# Altium footprint library CM4.PcbLib: 10 footprints
Each footprint in its own frame and in the unit in brackets; x right, y up, seen from the top. Pads: shape width x height; smd on the part's side, far side on the other; paste and mask are expansions set on the pad; w line width, h text height; cw(c..) or ccw(c..) is an arc to the next point about the centre after c.
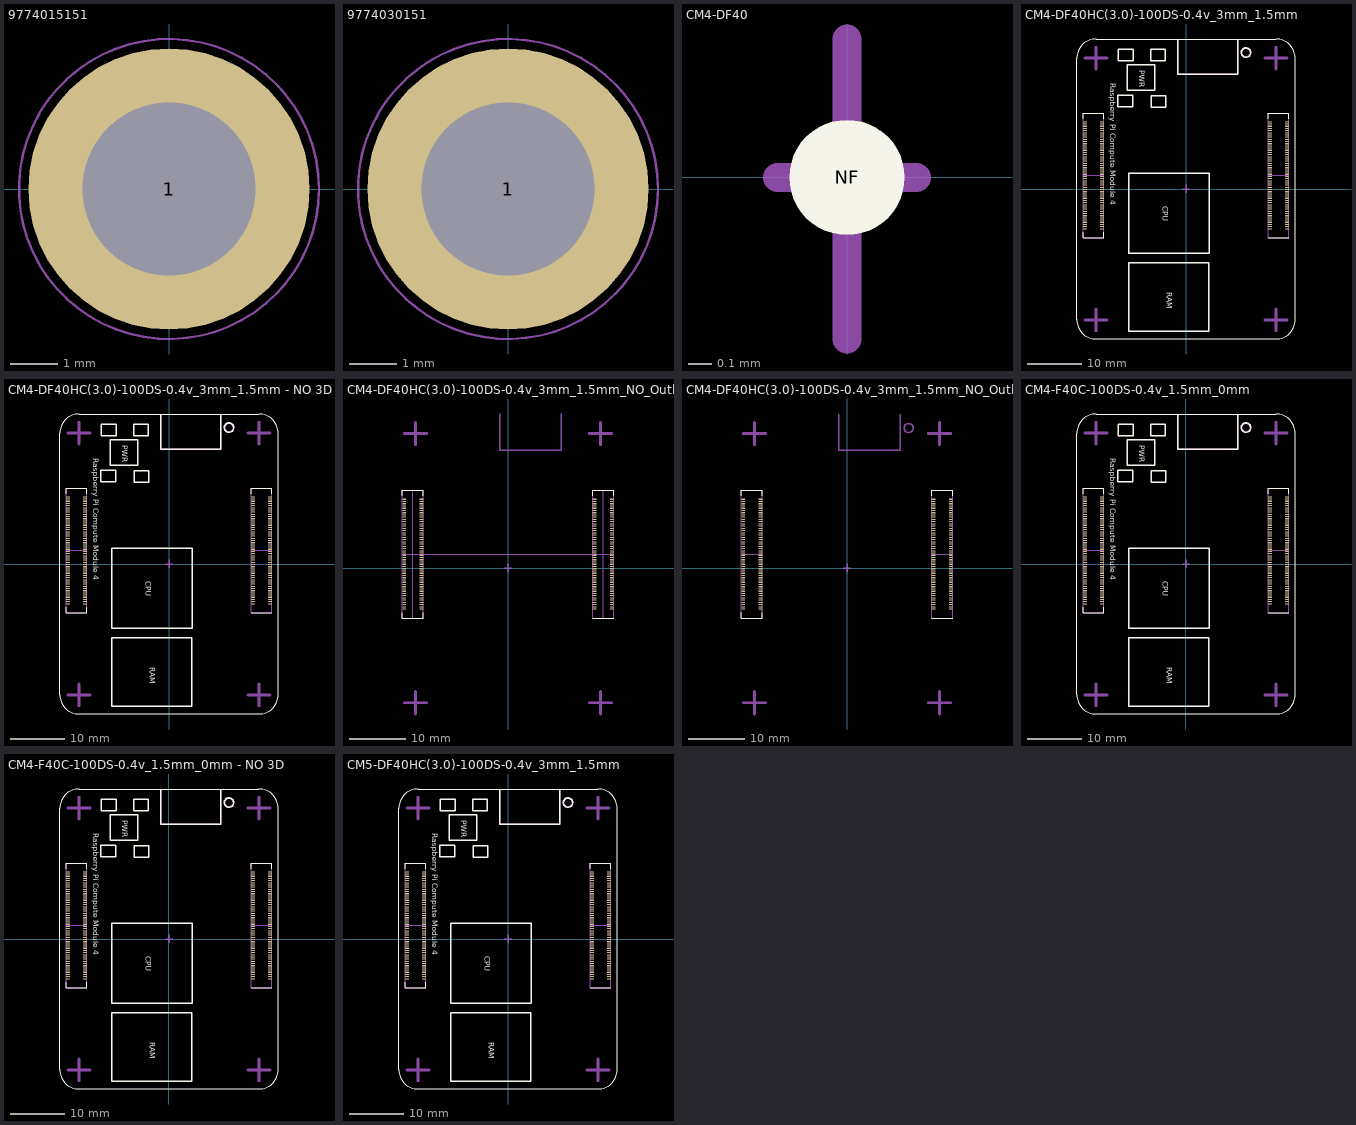
[diagram p0: the footprints below, top view; thin cyan lines are the x and y axes]

## 9774015151 [mm] "SMT Steel Spacer with internal Thread M2.5, height 1.5mm"
height 1.5
pads (1):
  round 6 / inner round 0 / far side round 0 hole 3.7 unplated: 1(0,0)
Top Paste:
  region: 0.325,2.902 0.57,2.874 1.044,2.738 1.488,2.524 1.89,2.239 2.239,1.89 2.524,1.488 2.738,1.044 2.874,0.57 2.902,0.325 1.872,0.325 1.842,0.467 1.749,0.743 1.615,1.002 1.443,1.237 1.237,1.442 1.002,1.614 0.744,1.748 0.468,1.842 0.325,1.872
  region: 2.902,-0.325 2.874,-0.57 2.738,-1.044 2.524,-1.488 2.239,-1.89 1.89,-2.239 1.488,-2.524 1.044,-2.738 0.57,-2.874 0.325,-2.902 0.325,-1.872 0.467,-1.842 0.743,-1.749 1.002,-1.615 1.237,-1.443 1.442,-1.237 1.614,-1.002 1.748,-0.744 1.842,-0.468 1.872,-0.325
  region: -0.325,-2.902 -0.57,-2.874 -1.044,-2.738 -1.488,-2.524 -1.89,-2.239 -2.239,-1.89 -2.524,-1.488 -2.738,-1.044 -2.874,-0.57 -2.902,-0.325 -1.872,-0.325 -1.842,-0.467 -1.749,-0.743 -1.615,-1.002 -1.443,-1.237 -1.237,-1.442 -1.002,-1.614 -0.744,-1.748 -0.468,-1.842 -0.325,-1.872
  region: -2.902,0.325 -2.874,0.57 -2.738,1.044 -2.524,1.488 -2.239,1.89 -1.89,2.239 -1.488,2.524 -1.044,2.738 -0.57,2.874 -0.325,2.902 -0.325,1.872 -0.467,1.842 -0.743,1.749 -1.002,1.615 -1.237,1.443 -1.442,1.237 -1.614,1.002 -1.748,0.744 -1.842,0.468 -1.872,0.325
Mechanical 11:
  circle w0.1: c0,0 r2.55
  text ".Designator" at -1.75,-0.75 h1.5
Mechanical 13:
  circle w0.1: c0,0 r2.55
Mechanical 15:
  circle w0.05: c0,0 r3.2
  lines w0.05: -0.5,0 0.5,0 ; 0,-0.5 0,0.5
3D body "9774015151.stp": height 1.5, standoff -1.4, extent -2.55,-2.547 2.55,2.547

## 9774030151 [mm] "SMT Steel Spacer with internal Thread M2.5, height 3mm"
height 3
pads (1):
  round 6 / inner round 0 / far side round 0 hole 3.7 unplated: 1(0,0)
Top Paste:
  region: 0.325,2.902 0.57,2.874 1.044,2.738 1.488,2.524 1.89,2.239 2.239,1.89 2.524,1.488 2.738,1.044 2.874,0.57 2.902,0.325 1.872,0.325 1.842,0.467 1.749,0.743 1.615,1.002 1.443,1.237 1.237,1.442 1.002,1.614 0.744,1.748 0.468,1.842 0.325,1.872
  region: 2.902,-0.325 2.874,-0.57 2.738,-1.044 2.524,-1.488 2.239,-1.89 1.89,-2.239 1.488,-2.524 1.044,-2.738 0.57,-2.874 0.325,-2.902 0.325,-1.872 0.467,-1.842 0.743,-1.749 1.002,-1.615 1.237,-1.443 1.442,-1.237 1.614,-1.002 1.748,-0.744 1.842,-0.468 1.872,-0.325
  region: -0.325,-2.902 -0.57,-2.874 -1.044,-2.738 -1.488,-2.524 -1.89,-2.239 -2.239,-1.89 -2.524,-1.488 -2.738,-1.044 -2.874,-0.57 -2.902,-0.325 -1.872,-0.325 -1.842,-0.467 -1.749,-0.743 -1.615,-1.002 -1.443,-1.237 -1.237,-1.442 -1.002,-1.614 -0.744,-1.748 -0.468,-1.842 -0.325,-1.872
  region: -2.902,0.325 -2.874,0.57 -2.738,1.044 -2.524,1.488 -2.239,1.89 -1.89,2.239 -1.488,2.524 -1.044,2.738 -0.57,2.874 -0.325,2.902 -0.325,1.872 -0.467,1.842 -0.743,1.749 -1.002,1.615 -1.237,1.443 -1.442,1.237 -1.614,1.002 -1.748,0.744 -1.842,0.468 -1.872,0.325
Mechanical 11:
  circle w0.1: c0,0 r2.55
  text ".Designator" at -1.75,-0.75 h1.5
Mechanical 13:
  circle w0.1: c0,0 r2.55
Mechanical 15:
  circle w0.05: c0,0 r3.2
  lines w0.05: -0.5,0 0.5,0 ; 0,-0.5 0,0.5
3D body "9774030151.stp": height 3, standoff -1.4, extent -2.55,-2.547 2.55,2.547

## CM4-DF40 [mm] "DF40"
pads (1):
  round 0.5 on Top Overlay mask+0: NF(0,0)
Mechanical 4:
  lines w0.127: -0.3,0 0.3,0 -0.3,0 ; 0,-0.7 0,0.6 0,-0.7

## CM4-DF40HC(3.0)-100DS-0.4v_3mm_1.5mm [mm] "DF40HC(3.0)-100DS-0.4v by Amornthep Phunsin"
pads (200):
  rect 0.7x0.2 smd: 1(18.5,-7.3) 2(15.42,-7.3) 3(18.5,-6.9) 4(15.42,-6.9) 5(18.5,-6.5) 6(15.42,-6.5) 7(18.5,-6.1) 8(15.42,-6.1) 9(18.5,-5.7) 10(15.42,-5.7) 11(18.5,-5.3) 12(15.42,-5.3) 13(18.5,-4.9) 14(15.42,-4.9) 15(18.5,-4.5) 16(15.42,-4.5) 17(18.5,-4.1) 18(15.42,-4.1) 19(18.5,-3.7) 20(15.42,-3.7) 21(18.5,-3.3) 22(15.42,-3.3) 23(18.5,-2.9) 24(15.42,-2.9) 25(18.5,-2.5) 26(15.42,-2.5) 27(18.5,-2.1) 28(15.42,-2.1) 29(18.5,-1.7) 30(15.42,-1.7) 31(18.5,-1.3) 32(15.42,-1.3) 33(18.5,-0.9) 34(15.42,-0.9) 35(18.5,-0.5) 36(15.42,-0.5) 37(18.5,-0.1) 38(15.42,-0.1) 39(18.5,0.3) 40(15.42,0.3) 41(18.5,0.7) 42(15.42,0.7) 43(18.5,1.1) 44(15.42,1.1) 45(18.5,1.5) 46(15.42,1.5) 47(18.5,1.9) 48(15.42,1.9) 49(18.5,2.3) 50(15.42,2.3) 51(18.5,2.7) 52(15.42,2.7) 53(18.5,3.1) 54(15.42,3.1) 55(18.5,3.5) 56(15.42,3.5) 57(18.5,3.9) 58(15.42,3.9) 59(18.5,4.3) 60(15.42,4.3) 61(18.5,4.7) 62(15.42,4.7) 63(18.5,5.1) 64(15.42,5.1) 65(18.5,5.5) 66(15.42,5.5) 67(18.5,5.9) 68(15.42,5.9) 69(18.5,6.3) 70(15.42,6.3) 71(18.5,6.7) 72(15.42,6.7) 73(18.5,7.1) 74(15.42,7.1) 75(18.5,7.5) 76(15.42,7.5) 77(18.5,7.9) 78(15.42,7.9) 79(18.5,8.3) 80(15.42,8.3) 81(18.5,8.7) 82(15.42,8.7) 83(18.5,9.1) 84(15.42,9.1) 85(18.5,9.5) 86(15.42,9.5) 87(18.5,9.9) 88(15.42,9.9) 89(18.5,10.3) 90(15.42,10.3) 91(18.5,10.7) 92(15.42,10.7) 93(18.5,11.1) 94(15.42,11.1) 95(18.5,11.5) 96(15.42,11.5) 97(18.5,11.9) 98(15.42,11.9) 99(18.5,12.3) 100(15.42,12.3) 101(-15.42,-7.3) 102(-18.5,-7.3) 103(-15.42,-6.9) 104(-18.5,-6.9) 105(-15.42,-6.5) 106(-18.5,-6.5) 107(-15.42,-6.1) 108(-18.5,-6.1) 109(-15.42,-5.7) 110(-18.5,-5.7) 111(-15.42,-5.3) 112(-18.5,-5.3) 113(-15.42,-4.9) 114(-18.5,-4.9) 115(-15.42,-4.5) 116(-18.5,-4.5) 117(-15.42,-4.1) 118(-18.5,-4.1) 119(-15.42,-3.7) 120(-18.5,-3.7) 121(-15.42,-3.3) 122(-18.5,-3.3) 123(-15.42,-2.9) 124(-18.5,-2.9) 125(-15.42,-2.5) 126(-18.5,-2.5) 127(-15.42,-2.1) 128(-18.5,-2.1) 129(-15.42,-1.7) 130(-18.5,-1.7) 131(-15.42,-1.3) 132(-18.5,-1.3) 133(-15.42,-0.9) 134(-18.5,-0.9) 135(-15.42,-0.5) 136(-18.5,-0.5) 137(-15.42,-0.1) 138(-18.5,-0.1) 139(-15.42,0.3) 140(-18.5,0.3) 141(-15.42,0.7) 142(-18.5,0.7) 143(-15.42,1.1) 144(-18.5,1.1) 145(-15.42,1.5) 146(-18.5,1.5) 147(-15.42,1.9) 148(-18.5,1.9) 149(-15.42,2.3) 150(-18.5,2.3) 151(-15.42,2.7) 152(-18.5,2.7) 153(-15.42,3.1) 154(-18.5,3.1) 155(-15.42,3.5) 156(-18.5,3.5) 157(-15.42,3.9) 158(-18.5,3.9) 159(-15.42,4.3) 160(-18.5,4.3) 161(-15.42,4.7) 162(-18.5,4.7) 163(-15.42,5.1) 164(-18.5,5.1) 165(-15.42,5.5) 166(-18.5,5.5) 167(-15.42,5.9) 168(-18.5,5.9) 169(-15.42,6.3) 170(-18.5,6.3) 171(-15.42,6.7) 172(-18.5,6.7) 173(-15.42,7.1) 174(-18.5,7.1) 175(-15.42,7.5) 176(-18.5,7.5) 177(-15.42,7.9) 178(-18.5,7.9) 179(-15.42,8.3) 180(-18.5,8.3) 181(-15.42,8.7) 182(-18.5,8.7) 183(-15.42,9.1) 184(-18.5,9.1) 185(-15.42,9.5) 186(-18.5,9.5) 187(-15.42,9.9) 188(-18.5,9.9) 189(-15.42,10.3) 190(-18.5,10.3) 191(-15.42,10.7) 192(-18.5,10.7) 193(-15.42,11.1) 194(-18.5,11.1) 195(-15.42,11.5) 196(-18.5,11.5) 197(-15.42,11.9) 198(-18.5,11.9) 199(-15.42,12.3) 200(-18.5,12.3)
Top Overlay:
  circle w0.254: c11,25 r0.86
  lines w0.12: -18.85,-7.9 -18.85,-8.9 -15.07,-8.9 -15.07,-7.9 ; -18.85,12.9 -18.85,13.9 -15.07,13.9 -15.07,12.9 ; 15.07,-8.9 18.85,-8.9 ; 15.07,12.9 15.07,13.9 18.85,13.9 18.85,12.9 ; -20,-24 ccw(c-16.5,-24) -16.5,-27.5 16.5,-27.5 ccw(c16.5,-24) 20,-24 20,24 ccw(c16.5,24) 16.5,27.5 -16.5,27.5 ccw(c-16.5,24) -20,24 -20,-24
  lines w0.254: -1.5,24 -1.5,27.5 -1.5,21 9.5,21 9.5,27.5 ; -12.5,15.1 -12.5,17.2 -9.8,17.2 -9.8,15.1 -12.5,15.1 ; -12.4,23.5 -12.4,25.6 -9.7,25.6 -9.7,23.5 -12.4,23.5 ; -10.8,18.1 -5.7,18.1 -5.7,22.8 -10.8,22.8 -10.8,18.1 ; -10.5,-26.1 4.2,-26.1 4.2,-13.5 -10.5,-13.5 -10.5,-26.1 ; -10.5,-11.8 4.3,-11.8 4.3,2.9 -10.5,2.9 -10.5,-11.8 ; -6.5,23.5 -6.5,25.6 -3.8,25.6 -3.8,23.5 -6.5,23.5 ; -6.4,15 -6.4,17.1 -3.7,17.1 -3.7,15 -6.4,15
  text "Raspberry Pi Compute Module 4" at -13.913,19.346 h1
  text "CPU" at -4.246,-3.154 h1
  text "RAM" at -3.546,-18.954 h1
  text "PWR" at -8.602,21.761 h1
Mechanical 4:
  circle w0.254: c11,25 r0.806
  lines w0.12: -18.85,-8.9 -15.07,-8.9 ; -18.85,-8.9 -18.85,13.9 ; -18.85,-8.9 -15.07,-8.9 ; -18.85,-8.9 -18.85,13.9 ; -18.85,13.9 -15.07,13.9 ; -18.85,13.9 -15.07,13.9 ; -15.07,-8.9 -15.07,13.9 ; -15.07,-8.9 -15.07,13.9 ; 15.07,-8.9 15.07,13.9 ; 15.07,-8.9 18.85,-8.9 ; 15.07,-8.9 15.07,13.9 ; 15.07,-8.9 18.85,-8.9 ; 15.07,13.9 18.85,13.9 ; 15.07,13.9 18.85,13.9 ; 18.85,-8.9 18.85,13.9 ; 18.85,-8.9 18.85,13.9 ; -18.83,2.5 -15.05,2.5 -18.83,2.5 ; 15.07,2.5 18.85,2.5 15.07,2.5
  lines w0.254: -1.5,27.5 -1.5,21 9.5,21 9.5,27.5 ; -0.7,0 0.7,0 -0.7,0 ; 0,-0.7 0,0.8 0,-0.7
  lines w0.5: -18.5,-24 -16.5,-24 ; -18.5,24 -16.5,24 ; -16.5,-26 -16.5,-24 ; -16.5,-22 -16.5,-24 ; -16.5,22 -16.5,24 ; -16.5,26 -16.5,24 ; -14.5,-24 -16.5,-24 ; -14.5,24 -16.5,24 ; 14.5,-24 16.5,-24 ; 14.5,24 16.5,24 ; 16.5,-26 16.5,-24 ; 16.5,-22 16.5,-24 ; 16.5,22 16.5,24 ; 16.5,26 16.5,24 ; 18.5,-24 16.5,-24 ; 18.5,24 16.5,24
  text "PCIe" at -18,-3.051 h0.7
  text "USB" at -16.9,-4.134 h0.7
  text "CAM1" at -16.9,0.749 h0.7
  text "HDMI1" at -18.1,5.958 h0.7
  text "ETH" at 16.5,-4.751 h0.7
  text "TV" at -17,-2.751 h0.7
  text "HDMI0" at -18,10.375 h0.7
  text "CAM0" at -18,0.783 h0.7
  text "5V" at 17,9.9 h0.7
  text "DSI0" at -16.9,6.949 h0.7
  text "DS1" at -17.5,13.049 h0.7
  text "1V8" at 15.8,11.225 h0.7
  text "3V3" at 15.8,8.625 h0.7
  text "SD" at 16.4,6.991 h0.7
  text "GPIO" at 16.5,0.625 h0.7
  text "Wireless / Cutout" at -0.932,23.1 h0.9
3D body "DF40HC(3.0)-100DS-0.4V.stp": height 2.9, standoff 0, extent -18.69,-8.785 -15.31,13.815
3D body "DF40HC(3.0)-100DS-0.4V.stp": height 2.9, standoff 0, extent 15.31,-8.785 18.69,13.815
3D body "cm4-rev1-3_new.STEP": height 6.75, standoff 1.97, extent -20,-27.5 20,27.5

## CM4-DF40HC(3.0)-100DS-0.4v_3mm_1.5mm - NO 3D [mm] "DF40HC(3.0)-100DS-0.4v by Amornthep Phunsin"
pads (200):
  rect 0.7x0.2 smd: 1(18.5,-7.3) 2(15.42,-7.3) 3(18.5,-6.9) 4(15.42,-6.9) 5(18.5,-6.5) 6(15.42,-6.5) 7(18.5,-6.1) 8(15.42,-6.1) 9(18.5,-5.7) 10(15.42,-5.7) 11(18.5,-5.3) 12(15.42,-5.3) 13(18.5,-4.9) 14(15.42,-4.9) 15(18.5,-4.5) 16(15.42,-4.5) 17(18.5,-4.1) 18(15.42,-4.1) 19(18.5,-3.7) 20(15.42,-3.7) 21(18.5,-3.3) 22(15.42,-3.3) 23(18.5,-2.9) 24(15.42,-2.9) 25(18.5,-2.5) 26(15.42,-2.5) 27(18.5,-2.1) 28(15.42,-2.1) 29(18.5,-1.7) 30(15.42,-1.7) 31(18.5,-1.3) 32(15.42,-1.3) 33(18.5,-0.9) 34(15.42,-0.9) 35(18.5,-0.5) 36(15.42,-0.5) 37(18.5,-0.1) 38(15.42,-0.1) 39(18.5,0.3) 40(15.42,0.3) 41(18.5,0.7) 42(15.42,0.7) 43(18.5,1.1) 44(15.42,1.1) 45(18.5,1.5) 46(15.42,1.5) 47(18.5,1.9) 48(15.42,1.9) 49(18.5,2.3) 50(15.42,2.3) 51(18.5,2.7) 52(15.42,2.7) 53(18.5,3.1) 54(15.42,3.1) 55(18.5,3.5) 56(15.42,3.5) 57(18.5,3.9) 58(15.42,3.9) 59(18.5,4.3) 60(15.42,4.3) 61(18.5,4.7) 62(15.42,4.7) 63(18.5,5.1) 64(15.42,5.1) 65(18.5,5.5) 66(15.42,5.5) 67(18.5,5.9) 68(15.42,5.9) 69(18.5,6.3) 70(15.42,6.3) 71(18.5,6.7) 72(15.42,6.7) 73(18.5,7.1) 74(15.42,7.1) 75(18.5,7.5) 76(15.42,7.5) 77(18.5,7.9) 78(15.42,7.9) 79(18.5,8.3) 80(15.42,8.3) 81(18.5,8.7) 82(15.42,8.7) 83(18.5,9.1) 84(15.42,9.1) 85(18.5,9.5) 86(15.42,9.5) 87(18.5,9.9) 88(15.42,9.9) 89(18.5,10.3) 90(15.42,10.3) 91(18.5,10.7) 92(15.42,10.7) 93(18.5,11.1) 94(15.42,11.1) 95(18.5,11.5) 96(15.42,11.5) 97(18.5,11.9) 98(15.42,11.9) 99(18.5,12.3) 100(15.42,12.3) 101(-15.42,-7.3) 102(-18.5,-7.3) 103(-15.42,-6.9) 104(-18.5,-6.9) 105(-15.42,-6.5) 106(-18.5,-6.5) 107(-15.42,-6.1) 108(-18.5,-6.1) 109(-15.42,-5.7) 110(-18.5,-5.7) 111(-15.42,-5.3) 112(-18.5,-5.3) 113(-15.42,-4.9) 114(-18.5,-4.9) 115(-15.42,-4.5) 116(-18.5,-4.5) 117(-15.42,-4.1) 118(-18.5,-4.1) 119(-15.42,-3.7) 120(-18.5,-3.7) 121(-15.42,-3.3) 122(-18.5,-3.3) 123(-15.42,-2.9) 124(-18.5,-2.9) 125(-15.42,-2.5) 126(-18.5,-2.5) 127(-15.42,-2.1) 128(-18.5,-2.1) 129(-15.42,-1.7) 130(-18.5,-1.7) 131(-15.42,-1.3) 132(-18.5,-1.3) 133(-15.42,-0.9) 134(-18.5,-0.9) 135(-15.42,-0.5) 136(-18.5,-0.5) 137(-15.42,-0.1) 138(-18.5,-0.1) 139(-15.42,0.3) 140(-18.5,0.3) 141(-15.42,0.7) 142(-18.5,0.7) 143(-15.42,1.1) 144(-18.5,1.1) 145(-15.42,1.5) 146(-18.5,1.5) 147(-15.42,1.9) 148(-18.5,1.9) 149(-15.42,2.3) 150(-18.5,2.3) 151(-15.42,2.7) 152(-18.5,2.7) 153(-15.42,3.1) 154(-18.5,3.1) 155(-15.42,3.5) 156(-18.5,3.5) 157(-15.42,3.9) 158(-18.5,3.9) 159(-15.42,4.3) 160(-18.5,4.3) 161(-15.42,4.7) 162(-18.5,4.7) 163(-15.42,5.1) 164(-18.5,5.1) 165(-15.42,5.5) 166(-18.5,5.5) 167(-15.42,5.9) 168(-18.5,5.9) 169(-15.42,6.3) 170(-18.5,6.3) 171(-15.42,6.7) 172(-18.5,6.7) 173(-15.42,7.1) 174(-18.5,7.1) 175(-15.42,7.5) 176(-18.5,7.5) 177(-15.42,7.9) 178(-18.5,7.9) 179(-15.42,8.3) 180(-18.5,8.3) 181(-15.42,8.7) 182(-18.5,8.7) 183(-15.42,9.1) 184(-18.5,9.1) 185(-15.42,9.5) 186(-18.5,9.5) 187(-15.42,9.9) 188(-18.5,9.9) 189(-15.42,10.3) 190(-18.5,10.3) 191(-15.42,10.7) 192(-18.5,10.7) 193(-15.42,11.1) 194(-18.5,11.1) 195(-15.42,11.5) 196(-18.5,11.5) 197(-15.42,11.9) 198(-18.5,11.9) 199(-15.42,12.3) 200(-18.5,12.3)
Top Overlay:
  circle w0.254: c11,25 r0.86
  lines w0.12: -18.85,-7.9 -18.85,-8.9 -15.07,-8.9 -15.07,-7.9 ; -18.85,12.9 -18.85,13.9 -15.07,13.9 -15.07,12.9 ; 15.07,-8.9 18.85,-8.9 ; 15.07,12.9 15.07,13.9 18.85,13.9 18.85,12.9 ; -20,-24 ccw(c-16.5,-24) -16.5,-27.5 16.5,-27.5 ccw(c16.5,-24) 20,-24 20,24 ccw(c16.5,24) 16.5,27.5 -16.5,27.5 ccw(c-16.5,24) -20,24 -20,-24
  lines w0.254: -1.5,24 -1.5,27.5 -1.5,21 9.5,21 9.5,27.5 ; -12.5,15.1 -12.5,17.2 -9.8,17.2 -9.8,15.1 -12.5,15.1 ; -12.4,23.5 -12.4,25.6 -9.7,25.6 -9.7,23.5 -12.4,23.5 ; -10.8,18.1 -5.7,18.1 -5.7,22.8 -10.8,22.8 -10.8,18.1 ; -10.5,-26.1 4.2,-26.1 4.2,-13.5 -10.5,-13.5 -10.5,-26.1 ; -10.5,-11.8 4.3,-11.8 4.3,2.9 -10.5,2.9 -10.5,-11.8 ; -6.5,23.5 -6.5,25.6 -3.8,25.6 -3.8,23.5 -6.5,23.5 ; -6.4,15 -6.4,17.1 -3.7,17.1 -3.7,15 -6.4,15
  text "Raspberry Pi Compute Module 4" at -13.913,19.346 h1
  text "CPU" at -4.246,-3.154 h1
  text "RAM" at -3.546,-18.954 h1
  text "PWR" at -8.602,21.761 h1
Mechanical 4:
  circle w0.254: c11,25 r0.806
  lines w0.12: -18.85,-8.9 -15.07,-8.9 ; -18.85,-8.9 -18.85,13.9 ; -18.85,-8.9 -15.07,-8.9 ; -18.85,-8.9 -18.85,13.9 ; -18.85,13.9 -15.07,13.9 ; -18.85,13.9 -15.07,13.9 ; -15.07,-8.9 -15.07,13.9 ; -15.07,-8.9 -15.07,13.9 ; 15.07,-8.9 15.07,13.9 ; 15.07,-8.9 18.85,-8.9 ; 15.07,-8.9 15.07,13.9 ; 15.07,-8.9 18.85,-8.9 ; 15.07,13.9 18.85,13.9 ; 15.07,13.9 18.85,13.9 ; 18.85,-8.9 18.85,13.9 ; 18.85,-8.9 18.85,13.9 ; -18.83,2.5 -15.05,2.5 -18.83,2.5 ; 15.07,2.5 18.85,2.5 15.07,2.5
  lines w0.254: -1.5,27.5 -1.5,21 9.5,21 9.5,27.5 ; -0.7,0 0.7,0 -0.7,0 ; 0,-0.7 0,0.8 0,-0.7
  lines w0.5: -18.5,-24 -16.5,-24 ; -18.5,24 -16.5,24 ; -16.5,-26 -16.5,-24 ; -16.5,-22 -16.5,-24 ; -16.5,22 -16.5,24 ; -16.5,26 -16.5,24 ; -14.5,-24 -16.5,-24 ; -14.5,24 -16.5,24 ; 14.5,-24 16.5,-24 ; 14.5,24 16.5,24 ; 16.5,-26 16.5,-24 ; 16.5,-22 16.5,-24 ; 16.5,22 16.5,24 ; 16.5,26 16.5,24 ; 18.5,-24 16.5,-24 ; 18.5,24 16.5,24
  text "PCIe" at -18,-3.051 h0.7
  text "USB" at -16.9,-4.134 h0.7
  text "CAM1" at -16.9,0.749 h0.7
  text "HDMI1" at -18.1,5.958 h0.7
  text "ETH" at 16.5,-4.751 h0.7
  text "TV" at -17,-2.751 h0.7
  text "HDMI0" at -18,10.375 h0.7
  text "CAM0" at -18,0.783 h0.7
  text "5V" at 17,9.9 h0.7
  text "DSI0" at -16.9,6.949 h0.7
  text "DS1" at -17.5,13.049 h0.7
  text "1V8" at 15.8,11.225 h0.7
  text "3V3" at 15.8,8.625 h0.7
  text "SD" at 16.4,6.991 h0.7
  text "GPIO" at 16.5,0.625 h0.7
  text "Wireless / Cutout" at -0.932,23.1 h0.9
3D body "DF40HC(3.0)-100DS-0.4V.stp": height 2.9, standoff 0, extent -18.69,-8.785 -15.31,13.815
3D body "DF40HC(3.0)-100DS-0.4V.stp": height 2.9, standoff 0, extent 15.31,-8.785 18.69,13.815

## CM4-DF40HC(3.0)-100DS-0.4v_3mm_1.5mm_NO_Outline [mm] "DF40HC(3.0)-100DS-0.4v by Amornthep Phunsin"
pads (200):
  rect 0.7x0.2 smd: 1(18.5,-7.3) 2(15.42,-7.3) 3(18.5,-6.9) 4(15.42,-6.9) 5(18.5,-6.5) 6(15.42,-6.5) 7(18.5,-6.1) 8(15.42,-6.1) 9(18.5,-5.7) 10(15.42,-5.7) 11(18.5,-5.3) 12(15.42,-5.3) 13(18.5,-4.9) 14(15.42,-4.9) 15(18.5,-4.5) 16(15.42,-4.5) 17(18.5,-4.1) 18(15.42,-4.1) 19(18.5,-3.7) 20(15.42,-3.7) 21(18.5,-3.3) 22(15.42,-3.3) 23(18.5,-2.9) 24(15.42,-2.9) 25(18.5,-2.5) 26(15.42,-2.5) 27(18.5,-2.1) 28(15.42,-2.1) 29(18.5,-1.7) 30(15.42,-1.7) 31(18.5,-1.3) 32(15.42,-1.3) 33(18.5,-0.9) 34(15.42,-0.9) 35(18.5,-0.5) 36(15.42,-0.5) 37(18.5,-0.1) 38(15.42,-0.1) 39(18.5,0.3) 40(15.42,0.3) 41(18.5,0.7) 42(15.42,0.7) 43(18.5,1.1) 44(15.42,1.1) 45(18.5,1.5) 46(15.42,1.5) 47(18.5,1.9) 48(15.42,1.9) 49(18.5,2.3) 50(15.42,2.3) 51(18.5,2.7) 52(15.42,2.7) 53(18.5,3.1) 54(15.42,3.1) 55(18.5,3.5) 56(15.42,3.5) 57(18.5,3.9) 58(15.42,3.9) 59(18.5,4.3) 60(15.42,4.3) 61(18.5,4.7) 62(15.42,4.7) 63(18.5,5.1) 64(15.42,5.1) 65(18.5,5.5) 66(15.42,5.5) 67(18.5,5.9) 68(15.42,5.9) 69(18.5,6.3) 70(15.42,6.3) 71(18.5,6.7) 72(15.42,6.7) 73(18.5,7.1) 74(15.42,7.1) 75(18.5,7.5) 76(15.42,7.5) 77(18.5,7.9) 78(15.42,7.9) 79(18.5,8.3) 80(15.42,8.3) 81(18.5,8.7) 82(15.42,8.7) 83(18.5,9.1) 84(15.42,9.1) 85(18.5,9.5) 86(15.42,9.5) 87(18.5,9.9) 88(15.42,9.9) 89(18.5,10.3) 90(15.42,10.3) 91(18.5,10.7) 92(15.42,10.7) 93(18.5,11.1) 94(15.42,11.1) 95(18.5,11.5) 96(15.42,11.5) 97(18.5,11.9) 98(15.42,11.9) 99(18.5,12.3) 100(15.42,12.3) 101(-15.42,-7.3) 102(-18.5,-7.3) 103(-15.42,-6.9) 104(-18.5,-6.9) 105(-15.42,-6.5) 106(-18.5,-6.5) 107(-15.42,-6.1) 108(-18.5,-6.1) 109(-15.42,-5.7) 110(-18.5,-5.7) 111(-15.42,-5.3) 112(-18.5,-5.3) 113(-15.42,-4.9) 114(-18.5,-4.9) 115(-15.42,-4.5) 116(-18.5,-4.5) 117(-15.42,-4.1) 118(-18.5,-4.1) 119(-15.42,-3.7) 120(-18.5,-3.7) 121(-15.42,-3.3) 122(-18.5,-3.3) 123(-15.42,-2.9) 124(-18.5,-2.9) 125(-15.42,-2.5) 126(-18.5,-2.5) 127(-15.42,-2.1) 128(-18.5,-2.1) 129(-15.42,-1.7) 130(-18.5,-1.7) 131(-15.42,-1.3) 132(-18.5,-1.3) 133(-15.42,-0.9) 134(-18.5,-0.9) 135(-15.42,-0.5) 136(-18.5,-0.5) 137(-15.42,-0.1) 138(-18.5,-0.1) 139(-15.42,0.3) 140(-18.5,0.3) 141(-15.42,0.7) 142(-18.5,0.7) 143(-15.42,1.1) 144(-18.5,1.1) 145(-15.42,1.5) 146(-18.5,1.5) 147(-15.42,1.9) 148(-18.5,1.9) 149(-15.42,2.3) 150(-18.5,2.3) 151(-15.42,2.7) 152(-18.5,2.7) 153(-15.42,3.1) 154(-18.5,3.1) 155(-15.42,3.5) 156(-18.5,3.5) 157(-15.42,3.9) 158(-18.5,3.9) 159(-15.42,4.3) 160(-18.5,4.3) 161(-15.42,4.7) 162(-18.5,4.7) 163(-15.42,5.1) 164(-18.5,5.1) 165(-15.42,5.5) 166(-18.5,5.5) 167(-15.42,5.9) 168(-18.5,5.9) 169(-15.42,6.3) 170(-18.5,6.3) 171(-15.42,6.7) 172(-18.5,6.7) 173(-15.42,7.1) 174(-18.5,7.1) 175(-15.42,7.5) 176(-18.5,7.5) 177(-15.42,7.9) 178(-18.5,7.9) 179(-15.42,8.3) 180(-18.5,8.3) 181(-15.42,8.7) 182(-18.5,8.7) 183(-15.42,9.1) 184(-18.5,9.1) 185(-15.42,9.5) 186(-18.5,9.5) 187(-15.42,9.9) 188(-18.5,9.9) 189(-15.42,10.3) 190(-18.5,10.3) 191(-15.42,10.7) 192(-18.5,10.7) 193(-15.42,11.1) 194(-18.5,11.1) 195(-15.42,11.5) 196(-18.5,11.5) 197(-15.42,11.9) 198(-18.5,11.9) 199(-15.42,12.3) 200(-18.5,12.3)
Top Overlay:
  lines w0.12: -18.85,-7.9 -18.85,-8.9 -15.07,-8.9 -15.07,-7.9 ; -18.85,12.9 -18.85,13.9 -15.07,13.9 -15.07,12.9 ; 15.07,-8.9 18.85,-8.9 ; 15.07,12.9 15.07,13.9 18.85,13.9 18.85,12.9
Mechanical 4:
  lines w0.12: -16.96,-8.9 -16.96,13.9 -18.85,13.9 ; -16.5,2.5 16.85,2.5 ; 16.96,-8.9 16.96,13.9 15.07,13.9 ; -18.85,-8.9 -18.85,13.9 ; -18.85,-8.9 -15.07,-8.9 ; -18.85,-8.9 -18.85,13.9 ; -18.85,-8.9 -15.07,-8.9 ; -18.85,13.9 -15.07,13.9 ; -18.85,13.9 -15.07,13.9 ; -15.07,-8.9 -15.07,13.9 ; -15.07,-8.9 -15.07,13.9 ; 15.07,-8.9 18.85,-8.9 ; 15.07,-8.9 15.07,13.9 ; 15.07,-8.9 18.85,-8.9 ; 15.07,-8.9 15.07,13.9 ; 15.07,13.9 18.85,13.9 ; 15.07,13.9 18.85,13.9 ; 15.07,13.9 18.85,13.9 ; 18.85,-8.9 18.85,13.9 ; 18.85,-8.9 18.85,13.9 ; -18.83,2.5 -15.05,2.5 -18.83,2.5 ; 15.07,2.5 18.85,2.5 15.07,2.5
  lines w0.254: -1.5,27.5 -1.5,21 9.5,21 9.5,27.5 ; -0.7,0 0.7,0 -0.7,0 ; 0,-0.7 0,0.8 0,-0.7
  lines w0.5: -18.5,-24 -16.5,-24 ; -18.5,24 -16.5,24 ; -16.5,-26 -16.5,-24 ; -16.5,-22 -16.5,-24 ; -16.5,22 -16.5,24 ; -16.5,26 -16.5,24 ; -14.5,-24 -16.5,-24 ; -14.5,24 -16.5,24 ; 14.5,-24 16.5,-24 ; 14.5,24 16.5,24 ; 16.5,-26 16.5,-24 ; 16.5,-22 16.5,-24 ; 16.5,22 16.5,24 ; 16.5,26 16.5,24 ; 18.5,-24 16.5,-24 ; 18.5,24 16.5,24
  text "Wireless / Cutout" at -0.932,23.1 h0.9
  text "GPIO" at 15.87,0.625 h0.7
  text "SD" at 15.87,6.991 h0.7
  text "3V3" at 15.8,8.625 h0.7
  text "1V8" at 15.8,11.225 h0.7
  text "DS1" at -18.05,13.049 h0.7
  text "DSI0" at -16.9,6.949 h0.7
  text "5V" at 17,9.9 h0.7
  text "CAM0" at -18.05,0.783 h0.7
  text "HDMI0" at -18.05,10.375 h0.7
  text "TV" at -17,-2.751 h0.7
  text "ETH" at 15.87,-4.751 h0.7
  text "HDMI1" at -18.1,5.958 h0.7
  text "CAM1" at -16.9,0.749 h0.7
  text "USB" at -16.9,-4.134 h0.7
  text "PCIe" at -18.05,-3.051 h0.7
3D body "DF40HC(3.0)-100DS-0.4V.stp": height 2.9, standoff 0, extent 15.31,-8.785 18.69,13.815
3D body "DF40HC(3.0)-100DS-0.4V.stp": height 2.9, standoff 0, extent -18.69,-8.785 -15.31,13.815

## CM4-DF40HC(3.0)-100DS-0.4v_3mm_1.5mm_NO_Outline-3D [mm] "DF40HC(3.0)-100DS-0.4v by Amornthep Phunsin"
pads (200):
  rect 0.7x0.2 smd: 1(18.5,-7.3) 2(15.42,-7.3) 3(18.5,-6.9) 4(15.42,-6.9) 5(18.5,-6.5) 6(15.42,-6.5) 7(18.5,-6.1) 8(15.42,-6.1) 9(18.5,-5.7) 10(15.42,-5.7) 11(18.5,-5.3) 12(15.42,-5.3) 13(18.5,-4.9) 14(15.42,-4.9) 15(18.5,-4.5) 16(15.42,-4.5) 17(18.5,-4.1) 18(15.42,-4.1) 19(18.5,-3.7) 20(15.42,-3.7) 21(18.5,-3.3) 22(15.42,-3.3) 23(18.5,-2.9) 24(15.42,-2.9) 25(18.5,-2.5) 26(15.42,-2.5) 27(18.5,-2.1) 28(15.42,-2.1) 29(18.5,-1.7) 30(15.42,-1.7) 31(18.5,-1.3) 32(15.42,-1.3) 33(18.5,-0.9) 34(15.42,-0.9) 35(18.5,-0.5) 36(15.42,-0.5) 37(18.5,-0.1) 38(15.42,-0.1) 39(18.5,0.3) 40(15.42,0.3) 41(18.5,0.7) 42(15.42,0.7) 43(18.5,1.1) 44(15.42,1.1) 45(18.5,1.5) 46(15.42,1.5) 47(18.5,1.9) 48(15.42,1.9) 49(18.5,2.3) 50(15.42,2.3) 51(18.5,2.7) 52(15.42,2.7) 53(18.5,3.1) 54(15.42,3.1) 55(18.5,3.5) 56(15.42,3.5) 57(18.5,3.9) 58(15.42,3.9) 59(18.5,4.3) 60(15.42,4.3) 61(18.5,4.7) 62(15.42,4.7) 63(18.5,5.1) 64(15.42,5.1) 65(18.5,5.5) 66(15.42,5.5) 67(18.5,5.9) 68(15.42,5.9) 69(18.5,6.3) 70(15.42,6.3) 71(18.5,6.7) 72(15.42,6.7) 73(18.5,7.1) 74(15.42,7.1) 75(18.5,7.5) 76(15.42,7.5) 77(18.5,7.9) 78(15.42,7.9) 79(18.5,8.3) 80(15.42,8.3) 81(18.5,8.7) 82(15.42,8.7) 83(18.5,9.1) 84(15.42,9.1) 85(18.5,9.5) 86(15.42,9.5) 87(18.5,9.9) 88(15.42,9.9) 89(18.5,10.3) 90(15.42,10.3) 91(18.5,10.7) 92(15.42,10.7) 93(18.5,11.1) 94(15.42,11.1) 95(18.5,11.5) 96(15.42,11.5) 97(18.5,11.9) 98(15.42,11.9) 99(18.5,12.3) 100(15.42,12.3) 101(-15.42,-7.3) 102(-18.5,-7.3) 103(-15.42,-6.9) 104(-18.5,-6.9) 105(-15.42,-6.5) 106(-18.5,-6.5) 107(-15.42,-6.1) 108(-18.5,-6.1) 109(-15.42,-5.7) 110(-18.5,-5.7) 111(-15.42,-5.3) 112(-18.5,-5.3) 113(-15.42,-4.9) 114(-18.5,-4.9) 115(-15.42,-4.5) 116(-18.5,-4.5) 117(-15.42,-4.1) 118(-18.5,-4.1) 119(-15.42,-3.7) 120(-18.5,-3.7) 121(-15.42,-3.3) 122(-18.5,-3.3) 123(-15.42,-2.9) 124(-18.5,-2.9) 125(-15.42,-2.5) 126(-18.5,-2.5) 127(-15.42,-2.1) 128(-18.5,-2.1) 129(-15.42,-1.7) 130(-18.5,-1.7) 131(-15.42,-1.3) 132(-18.5,-1.3) 133(-15.42,-0.9) 134(-18.5,-0.9) 135(-15.42,-0.5) 136(-18.5,-0.5) 137(-15.42,-0.1) 138(-18.5,-0.1) 139(-15.42,0.3) 140(-18.5,0.3) 141(-15.42,0.7) 142(-18.5,0.7) 143(-15.42,1.1) 144(-18.5,1.1) 145(-15.42,1.5) 146(-18.5,1.5) 147(-15.42,1.9) 148(-18.5,1.9) 149(-15.42,2.3) 150(-18.5,2.3) 151(-15.42,2.7) 152(-18.5,2.7) 153(-15.42,3.1) 154(-18.5,3.1) 155(-15.42,3.5) 156(-18.5,3.5) 157(-15.42,3.9) 158(-18.5,3.9) 159(-15.42,4.3) 160(-18.5,4.3) 161(-15.42,4.7) 162(-18.5,4.7) 163(-15.42,5.1) 164(-18.5,5.1) 165(-15.42,5.5) 166(-18.5,5.5) 167(-15.42,5.9) 168(-18.5,5.9) 169(-15.42,6.3) 170(-18.5,6.3) 171(-15.42,6.7) 172(-18.5,6.7) 173(-15.42,7.1) 174(-18.5,7.1) 175(-15.42,7.5) 176(-18.5,7.5) 177(-15.42,7.9) 178(-18.5,7.9) 179(-15.42,8.3) 180(-18.5,8.3) 181(-15.42,8.7) 182(-18.5,8.7) 183(-15.42,9.1) 184(-18.5,9.1) 185(-15.42,9.5) 186(-18.5,9.5) 187(-15.42,9.9) 188(-18.5,9.9) 189(-15.42,10.3) 190(-18.5,10.3) 191(-15.42,10.7) 192(-18.5,10.7) 193(-15.42,11.1) 194(-18.5,11.1) 195(-15.42,11.5) 196(-18.5,11.5) 197(-15.42,11.9) 198(-18.5,11.9) 199(-15.42,12.3) 200(-18.5,12.3)
Top Overlay:
  lines w0.12: -18.85,-7.9 -18.85,-8.9 -15.07,-8.9 -15.07,-7.9 ; -18.85,12.9 -18.85,13.9 -15.07,13.9 -15.07,12.9 ; 15.07,-8.9 18.85,-8.9 ; 15.07,12.9 15.07,13.9 18.85,13.9 18.85,12.9
Mechanical 4:
  circle w0.254: c11,25 r0.806
  lines w0.12: -18.85,-8.9 -15.07,-8.9 ; -18.85,-8.9 -18.85,13.9 ; -18.85,-8.9 -15.07,-8.9 ; -18.85,-8.9 -18.85,13.9 ; -18.85,13.9 -15.07,13.9 ; -18.85,13.9 -15.07,13.9 ; -15.07,-8.9 -15.07,13.9 ; -15.07,-8.9 -15.07,13.9 ; 15.07,-8.9 15.07,13.9 ; 15.07,-8.9 18.85,-8.9 ; 15.07,-8.9 15.07,13.9 ; 15.07,-8.9 18.85,-8.9 ; 15.07,13.9 18.85,13.9 ; 15.07,13.9 18.85,13.9 ; 18.85,-8.9 18.85,13.9 ; 18.85,-8.9 18.85,13.9 ; -18.83,2.5 -15.05,2.5 -18.83,2.5 ; 15.07,2.5 18.85,2.5 15.07,2.5
  lines w0.254: -1.5,27.5 -1.5,21 9.5,21 9.5,27.5 ; -0.7,0 0.7,0 -0.7,0 ; 0,-0.7 0,0.8 0,-0.7
  lines w0.5: -18.5,-24 -16.5,-24 ; -18.5,24 -16.5,24 ; -16.5,-26 -16.5,-24 ; -16.5,-22 -16.5,-24 ; -16.5,22 -16.5,24 ; -16.5,26 -16.5,24 ; -14.5,-24 -16.5,-24 ; -14.5,24 -16.5,24 ; 14.5,-24 16.5,-24 ; 14.5,24 16.5,24 ; 16.5,-26 16.5,-24 ; 16.5,-22 16.5,-24 ; 16.5,22 16.5,24 ; 16.5,26 16.5,24 ; 18.5,-24 16.5,-24 ; 18.5,24 16.5,24
  text "PCIe" at -18,-3.051 h0.7
  text "USB" at -16.9,-4.134 h0.7
  text "CAM1" at -16.9,0.749 h0.7
  text "HDMI1" at -18.1,5.958 h0.7
  text "ETH" at 16.5,-4.751 h0.7
  text "TV" at -17,-2.751 h0.7
  text "HDMI0" at -18,10.375 h0.7
  text "CAM0" at -18,0.783 h0.7
  text "5V" at 17,9.9 h0.7
  text "DSI0" at -16.9,6.949 h0.7
  text "DS1" at -17.5,13.049 h0.7
  text "1V8" at 15.8,11.225 h0.7
  text "3V3" at 15.8,8.625 h0.7
  text "SD" at 16.4,6.991 h0.7
  text "GPIO" at 16.5,0.625 h0.7
  text "Wireless / Cutout" at -0.932,23.1 h0.9
3D body "DF40HC(3.0)-100DS-0.4V.stp": height 2.9, standoff 0, extent -18.69,-8.785 -15.31,13.815
3D body "DF40HC(3.0)-100DS-0.4V.stp": height 2.9, standoff 0, extent 15.31,-8.785 18.69,13.815

## CM4-F40C-100DS-0.4v_1.5mm_0mm [mm] "DF40C-100DS-0.4v by Amornthep Phunsin"
pads (200):
  rect 0.7x0.2 smd: 1(18.5,-7.3) 2(15.42,-7.3) 3(18.5,-6.9) 4(15.42,-6.9) 5(18.5,-6.5) 6(15.42,-6.5) 7(18.5,-6.1) 8(15.42,-6.1) 9(18.5,-5.7) 10(15.42,-5.7) 11(18.5,-5.3) 12(15.42,-5.3) 13(18.5,-4.9) 14(15.42,-4.9) 15(18.5,-4.5) 16(15.42,-4.5) 17(18.5,-4.1) 18(15.42,-4.1) 19(18.5,-3.7) 20(15.42,-3.7) 21(18.5,-3.3) 22(15.42,-3.3) 23(18.5,-2.9) 24(15.42,-2.9) 25(18.5,-2.5) 26(15.42,-2.5) 27(18.5,-2.1) 28(15.42,-2.1) 29(18.5,-1.7) 30(15.42,-1.7) 31(18.5,-1.3) 32(15.42,-1.3) 33(18.5,-0.9) 34(15.42,-0.9) 35(18.5,-0.5) 36(15.42,-0.5) 37(18.5,-0.1) 38(15.42,-0.1) 39(18.5,0.3) 40(15.42,0.3) 41(18.5,0.7) 42(15.42,0.7) 43(18.5,1.1) 44(15.42,1.1) 45(18.5,1.5) 46(15.42,1.5) 47(18.5,1.9) 48(15.42,1.9) 49(18.5,2.3) 50(15.42,2.3) 51(18.5,2.7) 52(15.42,2.7) 53(18.5,3.1) 54(15.42,3.1) 55(18.5,3.5) 56(15.42,3.5) 57(18.5,3.9) 58(15.42,3.9) 59(18.5,4.3) 60(15.42,4.3) 61(18.5,4.7) 62(15.42,4.7) 63(18.5,5.1) 64(15.42,5.1) 65(18.5,5.5) 66(15.42,5.5) 67(18.5,5.9) 68(15.42,5.9) 69(18.5,6.3) 70(15.42,6.3) 71(18.5,6.7) 72(15.42,6.7) 73(18.5,7.1) 74(15.42,7.1) 75(18.5,7.5) 76(15.42,7.5) 77(18.5,7.9) 78(15.42,7.9) 79(18.5,8.3) 80(15.42,8.3) 81(18.5,8.7) 82(15.42,8.7) 83(18.5,9.1) 84(15.42,9.1) 85(18.5,9.5) 86(15.42,9.5) 87(18.5,9.9) 88(15.42,9.9) 89(18.5,10.3) 90(15.42,10.3) 91(18.5,10.7) 92(15.42,10.7) 93(18.5,11.1) 94(15.42,11.1) 95(18.5,11.5) 96(15.42,11.5) 97(18.5,11.9) 98(15.42,11.9) 99(18.5,12.3) 100(15.42,12.3) 101(-15.42,-7.3) 102(-18.5,-7.3) 103(-15.42,-6.9) 104(-18.5,-6.9) 105(-15.42,-6.5) 106(-18.5,-6.5) 107(-15.42,-6.1) 108(-18.5,-6.1) 109(-15.42,-5.7) 110(-18.5,-5.7) 111(-15.42,-5.3) 112(-18.5,-5.3) 113(-15.42,-4.9) 114(-18.5,-4.9) 115(-15.42,-4.5) 116(-18.5,-4.5) 117(-15.42,-4.1) 118(-18.5,-4.1) 119(-15.42,-3.7) 120(-18.5,-3.7) 121(-15.42,-3.3) 122(-18.5,-3.3) 123(-15.42,-2.9) 124(-18.5,-2.9) 125(-15.42,-2.5) 126(-18.5,-2.5) 127(-15.42,-2.1) 128(-18.5,-2.1) 129(-15.42,-1.7) 130(-18.5,-1.7) 131(-15.42,-1.3) 132(-18.5,-1.3) 133(-15.42,-0.9) 134(-18.5,-0.9) 135(-15.42,-0.5) 136(-18.5,-0.5) 137(-15.42,-0.1) 138(-18.5,-0.1) 139(-15.42,0.3) 140(-18.5,0.3) 141(-15.42,0.7) 142(-18.5,0.7) 143(-15.42,1.1) 144(-18.5,1.1) 145(-15.42,1.5) 146(-18.5,1.5) 147(-15.42,1.9) 148(-18.5,1.9) 149(-15.42,2.3) 150(-18.5,2.3) 151(-15.42,2.7) 152(-18.5,2.7) 153(-15.42,3.1) 154(-18.5,3.1) 155(-15.42,3.5) 156(-18.5,3.5) 157(-15.42,3.9) 158(-18.5,3.9) 159(-15.42,4.3) 160(-18.5,4.3) 161(-15.42,4.7) 162(-18.5,4.7) 163(-15.42,5.1) 164(-18.5,5.1) 165(-15.42,5.5) 166(-18.5,5.5) 167(-15.42,5.9) 168(-18.5,5.9) 169(-15.42,6.3) 170(-18.5,6.3) 171(-15.42,6.7) 172(-18.5,6.7) 173(-15.42,7.1) 174(-18.5,7.1) 175(-15.42,7.5) 176(-18.5,7.5) 177(-15.42,7.9) 178(-18.5,7.9) 179(-15.42,8.3) 180(-18.5,8.3) 181(-15.42,8.7) 182(-18.5,8.7) 183(-15.42,9.1) 184(-18.5,9.1) 185(-15.42,9.5) 186(-18.5,9.5) 187(-15.42,9.9) 188(-18.5,9.9) 189(-15.42,10.3) 190(-18.5,10.3) 191(-15.42,10.7) 192(-18.5,10.7) 193(-15.42,11.1) 194(-18.5,11.1) 195(-15.42,11.5) 196(-18.5,11.5) 197(-15.42,11.9) 198(-18.5,11.9) 199(-15.42,12.3) 200(-18.5,12.3)
Top Overlay:
  circle w0.254: c11,25 r0.86
  lines w0.02: -1.5,24 -1.5,27.5 -1.5,21 9.5,21 9.5,27.5
  lines w0.12: -18.85,-7.9 -18.85,-8.9 -15.07,-8.9 ; -18.85,12.9 -18.85,13.9 -15.07,13.9 ; 15.07,-8.9 18.85,-8.9 ; 18.85,12.9 18.85,13.9 15.07,13.9 ; -15.07,-8.9 -15.07,-7.9 -15.07,-8.9 ; -15.07,13.9 -15.07,12.9 -15.07,13.9 ; 15.07,13.9 15.07,12.9 15.07,13.9 ; -20,-24 ccw(c-16.5,-24) -16.5,-27.5 16.5,-27.5 ccw(c16.5,-24) 20,-24 20,24 ccw(c16.5,24) 16.5,27.5 -16.5,27.5 ccw(c-16.5,24) -20,24 -20,-24
  lines w0.254: -1.5,24 -1.5,27.5 -1.5,21 9.5,21 9.5,27.5 ; -12.5,15.1 -9.8,15.1 -9.8,17.2 -12.5,17.2 -12.5,15.1 ; -12.4,23.5 -9.7,23.5 -9.7,25.6 -12.4,25.6 -12.4,23.5 ; -10.8,18.1 -10.8,22.8 -5.7,22.8 -5.7,18.1 -10.8,18.1 ; -10.5,-26.1 -10.5,-13.5 4.2,-13.5 4.2,-26.1 -10.5,-26.1 ; -10.5,-11.8 -10.5,2.9 4.3,2.9 4.3,-11.8 -10.5,-11.8 ; -6.5,23.5 -3.8,23.5 -3.8,25.6 -6.5,25.6 -6.5,23.5 ; -6.4,15 -3.7,15 -3.7,17.1 -6.4,17.1 -6.4,15
  text "PWR" at -8.602,21.761 h1
  text "RAM" at -3.546,-18.954 h1
  text "CPU" at -4.246,-3.154 h1
  text "Raspberry Pi Compute Module 4" at -13.913,19.346 h1
Mechanical 4:
  circle w0.254: c11,25 r0.806
  lines w0.12: -18.83,2.5 -15.05,2.5 ; 15.07,2.5 18.85,2.5 ; -18.85,-8.9 -15.07,-8.9 -15.07,13.9 -18.85,13.9 -18.85,-8.9 ; 15.07,-8.9 15.07,13.9 18.85,13.9 18.85,-8.9 15.07,-8.9
  lines w0.254: -1.5,27.5 -1.5,21 9.5,21 9.5,27.5 ; -0.7,0 0.7,0 ; 0,-0.7 0,0.8
  lines w0.5: -18.5,-24 -16.5,-24 ; -18.5,24 -16.5,24 ; -16.5,-26 -16.5,-24 ; -16.5,-22 -16.5,-24 ; -16.5,22 -16.5,24 ; -16.5,26 -16.5,24 ; -14.5,-24 -16.5,-24 ; -14.5,24 -16.5,24 ; 14.5,-24 16.5,-24 ; 14.5,24 16.5,24 ; 16.5,-26 16.5,-24 ; 16.5,-22 16.5,-24 ; 16.5,22 16.5,24 ; 16.5,26 16.5,24 ; 18.5,-24 16.5,-24 ; 18.5,24 16.5,24
  text "Wireless / Cutout" at -0.932,23.1 h0.9
  text "PCIe" at -18,-3.051 h0.7
  text "USB" at -16.9,-4.134 h0.7
  text "CAM1" at -16.9,0.749 h0.7
  text "HDMI1" at -18.1,5.958 h0.7
  text "ETH" at 16.5,-4.751 h0.7
  text "TV" at -17,-2.751 h0.7
  text "HDMI0" at -18,10.375 h0.7
  text "CAM0" at -18,0.783 h0.7
  text "5V" at 17,9.9 h0.7
  text "DSI0" at -16.9,6.949 h0.7
  text "DS1" at -17.5,13.049 h0.7
  text "1V8" at 15.8,11.225 h0.7
  text "3V3" at 15.8,8.625 h0.7
  text "SD" at 16.4,6.991 h0.7
  text "GPIO" at 16.5,0.625 h0.7
3D body "DF40C-100DS.stp": height 1.4, standoff -0.05, extent 15.31,-8.785 18.69,13.815
3D body "DF40C-100DS.stp": height 1.4, standoff -0.05, extent -18.69,-8.785 -15.31,13.815
3D body "cm4-rev1-3_new.STEP": height 5.16, standoff 0.38, extent -20,-27.5 20,27.5

## CM4-F40C-100DS-0.4v_1.5mm_0mm - NO 3D [mm] "DF40C-100DS-0.4v by Amornthep Phunsin"
pads (200):
  rect 0.7x0.2 smd: 1(18.5,-7.3) 2(15.42,-7.3) 3(18.5,-6.9) 4(15.42,-6.9) 5(18.5,-6.5) 6(15.42,-6.5) 7(18.5,-6.1) 8(15.42,-6.1) 9(18.5,-5.7) 10(15.42,-5.7) 11(18.5,-5.3) 12(15.42,-5.3) 13(18.5,-4.9) 14(15.42,-4.9) 15(18.5,-4.5) 16(15.42,-4.5) 17(18.5,-4.1) 18(15.42,-4.1) 19(18.5,-3.7) 20(15.42,-3.7) 21(18.5,-3.3) 22(15.42,-3.3) 23(18.5,-2.9) 24(15.42,-2.9) 25(18.5,-2.5) 26(15.42,-2.5) 27(18.5,-2.1) 28(15.42,-2.1) 29(18.5,-1.7) 30(15.42,-1.7) 31(18.5,-1.3) 32(15.42,-1.3) 33(18.5,-0.9) 34(15.42,-0.9) 35(18.5,-0.5) 36(15.42,-0.5) 37(18.5,-0.1) 38(15.42,-0.1) 39(18.5,0.3) 40(15.42,0.3) 41(18.5,0.7) 42(15.42,0.7) 43(18.5,1.1) 44(15.42,1.1) 45(18.5,1.5) 46(15.42,1.5) 47(18.5,1.9) 48(15.42,1.9) 49(18.5,2.3) 50(15.42,2.3) 51(18.5,2.7) 52(15.42,2.7) 53(18.5,3.1) 54(15.42,3.1) 55(18.5,3.5) 56(15.42,3.5) 57(18.5,3.9) 58(15.42,3.9) 59(18.5,4.3) 60(15.42,4.3) 61(18.5,4.7) 62(15.42,4.7) 63(18.5,5.1) 64(15.42,5.1) 65(18.5,5.5) 66(15.42,5.5) 67(18.5,5.9) 68(15.42,5.9) 69(18.5,6.3) 70(15.42,6.3) 71(18.5,6.7) 72(15.42,6.7) 73(18.5,7.1) 74(15.42,7.1) 75(18.5,7.5) 76(15.42,7.5) 77(18.5,7.9) 78(15.42,7.9) 79(18.5,8.3) 80(15.42,8.3) 81(18.5,8.7) 82(15.42,8.7) 83(18.5,9.1) 84(15.42,9.1) 85(18.5,9.5) 86(15.42,9.5) 87(18.5,9.9) 88(15.42,9.9) 89(18.5,10.3) 90(15.42,10.3) 91(18.5,10.7) 92(15.42,10.7) 93(18.5,11.1) 94(15.42,11.1) 95(18.5,11.5) 96(15.42,11.5) 97(18.5,11.9) 98(15.42,11.9) 99(18.5,12.3) 100(15.42,12.3) 101(-15.42,-7.3) 102(-18.5,-7.3) 103(-15.42,-6.9) 104(-18.5,-6.9) 105(-15.42,-6.5) 106(-18.5,-6.5) 107(-15.42,-6.1) 108(-18.5,-6.1) 109(-15.42,-5.7) 110(-18.5,-5.7) 111(-15.42,-5.3) 112(-18.5,-5.3) 113(-15.42,-4.9) 114(-18.5,-4.9) 115(-15.42,-4.5) 116(-18.5,-4.5) 117(-15.42,-4.1) 118(-18.5,-4.1) 119(-15.42,-3.7) 120(-18.5,-3.7) 121(-15.42,-3.3) 122(-18.5,-3.3) 123(-15.42,-2.9) 124(-18.5,-2.9) 125(-15.42,-2.5) 126(-18.5,-2.5) 127(-15.42,-2.1) 128(-18.5,-2.1) 129(-15.42,-1.7) 130(-18.5,-1.7) 131(-15.42,-1.3) 132(-18.5,-1.3) 133(-15.42,-0.9) 134(-18.5,-0.9) 135(-15.42,-0.5) 136(-18.5,-0.5) 137(-15.42,-0.1) 138(-18.5,-0.1) 139(-15.42,0.3) 140(-18.5,0.3) 141(-15.42,0.7) 142(-18.5,0.7) 143(-15.42,1.1) 144(-18.5,1.1) 145(-15.42,1.5) 146(-18.5,1.5) 147(-15.42,1.9) 148(-18.5,1.9) 149(-15.42,2.3) 150(-18.5,2.3) 151(-15.42,2.7) 152(-18.5,2.7) 153(-15.42,3.1) 154(-18.5,3.1) 155(-15.42,3.5) 156(-18.5,3.5) 157(-15.42,3.9) 158(-18.5,3.9) 159(-15.42,4.3) 160(-18.5,4.3) 161(-15.42,4.7) 162(-18.5,4.7) 163(-15.42,5.1) 164(-18.5,5.1) 165(-15.42,5.5) 166(-18.5,5.5) 167(-15.42,5.9) 168(-18.5,5.9) 169(-15.42,6.3) 170(-18.5,6.3) 171(-15.42,6.7) 172(-18.5,6.7) 173(-15.42,7.1) 174(-18.5,7.1) 175(-15.42,7.5) 176(-18.5,7.5) 177(-15.42,7.9) 178(-18.5,7.9) 179(-15.42,8.3) 180(-18.5,8.3) 181(-15.42,8.7) 182(-18.5,8.7) 183(-15.42,9.1) 184(-18.5,9.1) 185(-15.42,9.5) 186(-18.5,9.5) 187(-15.42,9.9) 188(-18.5,9.9) 189(-15.42,10.3) 190(-18.5,10.3) 191(-15.42,10.7) 192(-18.5,10.7) 193(-15.42,11.1) 194(-18.5,11.1) 195(-15.42,11.5) 196(-18.5,11.5) 197(-15.42,11.9) 198(-18.5,11.9) 199(-15.42,12.3) 200(-18.5,12.3)
Top Overlay:
  circle w0.254: c11,25 r0.86
  lines w0.02: -1.5,24 -1.5,27.5 -1.5,21 9.5,21 9.5,27.5
  lines w0.12: -18.85,-7.9 -18.85,-8.9 -15.07,-8.9 ; -18.85,12.9 -18.85,13.9 -15.07,13.9 ; 15.07,-8.9 18.85,-8.9 ; 18.85,12.9 18.85,13.9 15.07,13.9 ; -15.07,-8.9 -15.07,-7.9 -15.07,-8.9 ; -15.07,13.9 -15.07,12.9 -15.07,13.9 ; 15.07,13.9 15.07,12.9 15.07,13.9 ; -20,-24 ccw(c-16.5,-24) -16.5,-27.5 16.5,-27.5 ccw(c16.5,-24) 20,-24 20,24 ccw(c16.5,24) 16.5,27.5 -16.5,27.5 ccw(c-16.5,24) -20,24 -20,-24
  lines w0.254: -1.5,24 -1.5,27.5 -1.5,21 9.5,21 9.5,27.5 ; -12.5,15.1 -12.5,17.2 -9.8,17.2 -9.8,15.1 -12.5,15.1 ; -12.4,23.5 -12.4,25.6 -9.7,25.6 -9.7,23.5 -12.4,23.5 ; -10.8,18.1 -5.7,18.1 -5.7,22.8 -10.8,22.8 -10.8,18.1 ; -10.5,-26.1 4.2,-26.1 4.2,-13.5 -10.5,-13.5 -10.5,-26.1 ; -10.5,-11.8 4.3,-11.8 4.3,2.9 -10.5,2.9 -10.5,-11.8 ; -6.5,23.5 -6.5,25.6 -3.8,25.6 -3.8,23.5 -6.5,23.5 ; -6.4,15 -6.4,17.1 -3.7,17.1 -3.7,15 -6.4,15
  text "Raspberry Pi Compute Module 4" at -13.913,19.346 h1
  text "CPU" at -4.246,-3.154 h1
  text "RAM" at -3.546,-18.954 h1
  text "PWR" at -8.602,21.761 h1
Mechanical 4:
  circle w0.254: c11,25 r0.806
  lines w0.12: -18.83,2.5 -15.05,2.5 ; 15.07,2.5 18.85,2.5 ; -18.85,-8.9 -18.85,13.9 -15.07,13.9 -15.07,-8.9 -18.85,-8.9 ; 15.07,-8.9 18.85,-8.9 18.85,13.9 15.07,13.9 15.07,-8.9
  lines w0.254: -1.5,27.5 -1.5,21 9.5,21 9.5,27.5 ; -0.7,0 0.7,0 ; 0,-0.7 0,0.8
  lines w0.5: -18.5,-24 -16.5,-24 ; -18.5,24 -16.5,24 ; -16.5,-26 -16.5,-24 ; -16.5,-22 -16.5,-24 ; -16.5,22 -16.5,24 ; -16.5,26 -16.5,24 ; -14.5,-24 -16.5,-24 ; -14.5,24 -16.5,24 ; 14.5,-24 16.5,-24 ; 14.5,24 16.5,24 ; 16.5,-26 16.5,-24 ; 16.5,-22 16.5,-24 ; 16.5,22 16.5,24 ; 16.5,26 16.5,24 ; 18.5,-24 16.5,-24 ; 18.5,24 16.5,24
  text "GPIO" at 16.5,0.625 h0.7
  text "SD" at 16.4,6.991 h0.7
  text "3V3" at 15.8,8.625 h0.7
  text "1V8" at 15.8,11.225 h0.7
  text "DS1" at -17.5,13.049 h0.7
  text "DSI0" at -16.9,6.949 h0.7
  text "5V" at 17,9.9 h0.7
  text "CAM0" at -18,0.783 h0.7
  text "HDMI0" at -18,10.375 h0.7
  text "TV" at -17,-2.751 h0.7
  text "ETH" at 16.5,-4.751 h0.7
  text "HDMI1" at -18.1,5.958 h0.7
  text "CAM1" at -16.9,0.749 h0.7
  text "USB" at -16.9,-4.134 h0.7
  text "PCIe" at -18,-3.051 h0.7
  text "Wireless / Cutout" at -0.932,23.1 h0.9
3D body "DF40C-100DS.stp": height 1.4, standoff -0.05, extent -18.69,-8.785 -15.31,13.815
3D body "DF40C-100DS.stp": height 1.4, standoff -0.05, extent 15.31,-8.785 18.69,13.815

## CM5-DF40HC(3.0)-100DS-0.4v_3mm_1.5mm [mm] "DF40HC(3.0)-100DS-0.4v by Amornthep Phunsin"
pads (200):
  rect 0.7x0.2 smd: 1(18.5,-7.3) 2(15.42,-7.3) 3(18.5,-6.9) 4(15.42,-6.9) 5(18.5,-6.5) 6(15.42,-6.5) 7(18.5,-6.1) 8(15.42,-6.1) 9(18.5,-5.7) 10(15.42,-5.7) 11(18.5,-5.3) 12(15.42,-5.3) 13(18.5,-4.9) 14(15.42,-4.9) 15(18.5,-4.5) 16(15.42,-4.5) 17(18.5,-4.1) 18(15.42,-4.1) 19(18.5,-3.7) 20(15.42,-3.7) 21(18.5,-3.3) 22(15.42,-3.3) 23(18.5,-2.9) 24(15.42,-2.9) 25(18.5,-2.5) 26(15.42,-2.5) 27(18.5,-2.1) 28(15.42,-2.1) 29(18.5,-1.7) 30(15.42,-1.7) 31(18.5,-1.3) 32(15.42,-1.3) 33(18.5,-0.9) 34(15.42,-0.9) 35(18.5,-0.5) 36(15.42,-0.5) 37(18.5,-0.1) 38(15.42,-0.1) 39(18.5,0.3) 40(15.42,0.3) 41(18.5,0.7) 42(15.42,0.7) 43(18.5,1.1) 44(15.42,1.1) 45(18.5,1.5) 46(15.42,1.5) 47(18.5,1.9) 48(15.42,1.9) 49(18.5,2.3) 50(15.42,2.3) 51(18.5,2.7) 52(15.42,2.7) 53(18.5,3.1) 54(15.42,3.1) 55(18.5,3.5) 56(15.42,3.5) 57(18.5,3.9) 58(15.42,3.9) 59(18.5,4.3) 60(15.42,4.3) 61(18.5,4.7) 62(15.42,4.7) 63(18.5,5.1) 64(15.42,5.1) 65(18.5,5.5) 66(15.42,5.5) 67(18.5,5.9) 68(15.42,5.9) 69(18.5,6.3) 70(15.42,6.3) 71(18.5,6.7) 72(15.42,6.7) 73(18.5,7.1) 74(15.42,7.1) 75(18.5,7.5) 76(15.42,7.5) 77(18.5,7.9) 78(15.42,7.9) 79(18.5,8.3) 80(15.42,8.3) 81(18.5,8.7) 82(15.42,8.7) 83(18.5,9.1) 84(15.42,9.1) 85(18.5,9.5) 86(15.42,9.5) 87(18.5,9.9) 88(15.42,9.9) 89(18.5,10.3) 90(15.42,10.3) 91(18.5,10.7) 92(15.42,10.7) 93(18.5,11.1) 94(15.42,11.1) 95(18.5,11.5) 96(15.42,11.5) 97(18.5,11.9) 98(15.42,11.9) 99(18.5,12.3) 100(15.42,12.3) 101(-15.42,-7.3) 102(-18.5,-7.3) 103(-15.42,-6.9) 104(-18.5,-6.9) 105(-15.42,-6.5) 106(-18.5,-6.5) 107(-15.42,-6.1) 108(-18.5,-6.1) 109(-15.42,-5.7) 110(-18.5,-5.7) 111(-15.42,-5.3) 112(-18.5,-5.3) 113(-15.42,-4.9) 114(-18.5,-4.9) 115(-15.42,-4.5) 116(-18.5,-4.5) 117(-15.42,-4.1) 118(-18.5,-4.1) 119(-15.42,-3.7) 120(-18.5,-3.7) 121(-15.42,-3.3) 122(-18.5,-3.3) 123(-15.42,-2.9) 124(-18.5,-2.9) 125(-15.42,-2.5) 126(-18.5,-2.5) 127(-15.42,-2.1) 128(-18.5,-2.1) 129(-15.42,-1.7) 130(-18.5,-1.7) 131(-15.42,-1.3) 132(-18.5,-1.3) 133(-15.42,-0.9) 134(-18.5,-0.9) 135(-15.42,-0.5) 136(-18.5,-0.5) 137(-15.42,-0.1) 138(-18.5,-0.1) 139(-15.42,0.3) 140(-18.5,0.3) 141(-15.42,0.7) 142(-18.5,0.7) 143(-15.42,1.1) 144(-18.5,1.1) 145(-15.42,1.5) 146(-18.5,1.5) 147(-15.42,1.9) 148(-18.5,1.9) 149(-15.42,2.3) 150(-18.5,2.3) 151(-15.42,2.7) 152(-18.5,2.7) 153(-15.42,3.1) 154(-18.5,3.1) 155(-15.42,3.5) 156(-18.5,3.5) 157(-15.42,3.9) 158(-18.5,3.9) 159(-15.42,4.3) 160(-18.5,4.3) 161(-15.42,4.7) 162(-18.5,4.7) 163(-15.42,5.1) 164(-18.5,5.1) 165(-15.42,5.5) 166(-18.5,5.5) 167(-15.42,5.9) 168(-18.5,5.9) 169(-15.42,6.3) 170(-18.5,6.3) 171(-15.42,6.7) 172(-18.5,6.7) 173(-15.42,7.1) 174(-18.5,7.1) 175(-15.42,7.5) 176(-18.5,7.5) 177(-15.42,7.9) 178(-18.5,7.9) 179(-15.42,8.3) 180(-18.5,8.3) 181(-15.42,8.7) 182(-18.5,8.7) 183(-15.42,9.1) 184(-18.5,9.1) 185(-15.42,9.5) 186(-18.5,9.5) 187(-15.42,9.9) 188(-18.5,9.9) 189(-15.42,10.3) 190(-18.5,10.3) 191(-15.42,10.7) 192(-18.5,10.7) 193(-15.42,11.1) 194(-18.5,11.1) 195(-15.42,11.5) 196(-18.5,11.5) 197(-15.42,11.9) 198(-18.5,11.9) 199(-15.42,12.3) 200(-18.5,12.3)
Top Overlay:
  circle w0.254: c11,25 r0.86
  lines w0.12: -18.85,-7.9 -18.85,-8.9 -15.07,-8.9 -15.07,-7.9 ; -18.85,12.9 -18.85,13.9 -15.07,13.9 -15.07,12.9 ; 15.07,-8.9 18.85,-8.9 ; 15.07,12.9 15.07,13.9 18.85,13.9 18.85,12.9 ; -20,-24 ccw(c-16.5,-24) -16.5,-27.5 16.5,-27.5 ccw(c16.5,-24) 20,-24 20,24 ccw(c16.5,24) 16.5,27.5 -16.5,27.5 ccw(c-16.5,24) -20,24 -20,-24
  lines w0.254: -1.5,24 -1.5,27.5 -1.5,21 9.5,21 9.5,27.5 ; -12.5,15.1 -9.8,15.1 -9.8,17.2 -12.5,17.2 -12.5,15.1 ; -12.4,23.5 -9.7,23.5 -9.7,25.6 -12.4,25.6 -12.4,23.5 ; -10.8,18.1 -10.8,22.8 -5.7,22.8 -5.7,18.1 -10.8,18.1 ; -10.5,-26.1 -10.5,-13.5 4.2,-13.5 4.2,-26.1 -10.5,-26.1 ; -10.5,-11.8 -10.5,2.9 4.3,2.9 4.3,-11.8 -10.5,-11.8 ; -6.5,23.5 -3.8,23.5 -3.8,25.6 -6.5,25.6 -6.5,23.5 ; -6.4,15 -3.7,15 -3.7,17.1 -6.4,17.1 -6.4,15
  text "PWR" at -8.602,21.761 h1
  text "RAM" at -3.546,-18.954 h1
  text "CPU" at -4.246,-3.154 h1
  text "Raspberry Pi Compute Module 4" at -13.913,19.346 h1
Mechanical 4:
  circle w0.254: c11,25 r0.806
  lines w0.12: -18.85,-8.9 -18.85,13.9 ; -18.85,-8.9 -15.07,-8.9 ; -18.85,-8.9 -18.85,13.9 ; -18.85,-8.9 -15.07,-8.9 ; -18.85,13.9 -15.07,13.9 ; -18.85,13.9 -15.07,13.9 ; -15.07,-8.9 -15.07,13.9 ; -15.07,-8.9 -15.07,13.9 ; 15.07,-8.9 18.85,-8.9 ; 15.07,-8.9 15.07,13.9 ; 15.07,-8.9 18.85,-8.9 ; 15.07,-8.9 15.07,13.9 ; 15.07,13.9 18.85,13.9 ; 15.07,13.9 18.85,13.9 ; 18.85,-8.9 18.85,13.9 ; 18.85,-8.9 18.85,13.9 ; -18.83,2.5 -15.05,2.5 -18.83,2.5 ; 15.07,2.5 18.85,2.5 15.07,2.5
  lines w0.254: -1.5,27.5 -1.5,21 9.5,21 9.5,27.5 ; -0.7,0 0.7,0 -0.7,0 ; 0,-0.7 0,0.8 0,-0.7
  lines w0.5: -18.5,-24 -16.5,-24 ; -18.5,24 -16.5,24 ; -16.5,-26 -16.5,-24 ; -16.5,-22 -16.5,-24 ; -16.5,22 -16.5,24 ; -16.5,26 -16.5,24 ; -14.5,-24 -16.5,-24 ; -14.5,24 -16.5,24 ; 14.5,-24 16.5,-24 ; 14.5,24 16.5,24 ; 16.5,-26 16.5,-24 ; 16.5,-22 16.5,-24 ; 16.5,22 16.5,24 ; 16.5,26 16.5,24 ; 18.5,-24 16.5,-24 ; 18.5,24 16.5,24
  text "Wireless / Cutout" at -0.932,23.1 h0.9
  text "GPIO" at 16.5,0.625 h0.7
  text "SD" at 16.4,6.991 h0.7
  text "3V3" at 15.8,8.625 h0.7
  text "1V8" at 15.8,11.225 h0.7
  text "DS1" at -17.5,13.049 h0.7
  text "DSI0" at -16.9,6.949 h0.7
  text "5V" at 17,9.9 h0.7
  text "CAM0" at -18,0.783 h0.7
  text "HDMI0" at -18,10.375 h0.7
  text "TV" at -17,-2.751 h0.7
  text "ETH" at 16.5,-4.751 h0.7
  text "HDMI1" at -18.1,5.958 h0.7
  text "CAM1" at -16.9,0.749 h0.7
  text "USB" at -16.9,-4.134 h0.7
  text "PCIe" at -18,-3.051 h0.7
3D body "DF40HC(3.0)-100DS-0.4V.stp": height 2.9, standoff 0, extent 15.31,-8.785 18.69,13.815
3D body "DF40HC(3.0)-100DS-0.4V.stp": height 2.9, standoff 0, extent -18.69,-8.785 -15.31,13.815
3D body "raspberry_cm5_lite.SLDPRT": height 6.75, standoff 0, extent -20,-27.5 20,27.5